# Altium footprint library E73-2G4M08S1C.PCBLib: 1 footprints
Each footprint in its own frame and in the unit in brackets; x right, y up, seen from the top. Pads: shape width x height; smd on the part's side, far side on the other; paste and mask are expansions set on the pad; w line width, h text height; cw(c..) or ccw(c..) is an arc to the next point about the centre after c.
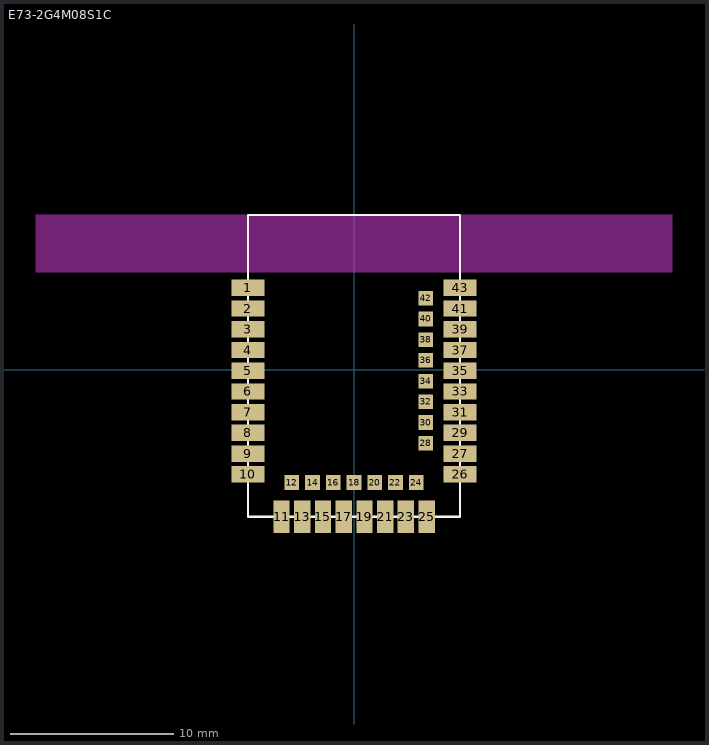
[diagram p0: the footprint, top view; thin cyan lines are the x and y axes]

## E73-2G4M08S1C [mm]
pads (43):
  rect 2x1 smd: 1(-6.5,5.03) 2(-6.5,3.76) 3(-6.5,2.49) 4(-6.5,1.22) 5(-6.5,-0.05) 6(-6.5,-1.32) 7(-6.5,-2.59) 8(-6.5,-3.86) 9(-6.5,-5.13) 10(-6.5,-6.4) 26(6.5,-6.4) 27(6.5,-5.13) 29(6.5,-3.86) 31(6.5,-2.59) 33(6.5,-1.32) 35(6.5,-0.05) 37(6.5,1.22) 39(6.5,2.49) 41(6.5,3.76) 43(6.5,5.03)
  rect 1x2 smd: 11(-4.44,-9) 13(-3.17,-9) 15(-1.9,-9) 17(-0.63,-9) 19(0.64,-9) 21(1.91,-9) 23(3.18,-9) 25(4.45,-9)
  rect 0.9x0.9 smd: 12(-3.81,-6.9) 14(-2.54,-6.9) 16(-1.27,-6.9) 18(0,-6.9) 20(1.27,-6.9) 22(2.54,-6.9) 24(3.81,-6.9) 28(4.4,-4.495) 30(4.4,-3.225) 32(4.4,-1.955) 34(4.4,-0.685) 36(4.4,0.585) 38(4.4,1.855) 40(4.4,3.125) 42(4.4,4.395)
Top Overlay:
  lines w0.127: -6.5,-9 -6.5,9.5 6.5,9.5 6.5,-9 -6.5,-9
Keep-Out Layer:
  region: 19.5,6 -19.5,6 -19.5,9.5 19.5,9.5
3D body "step_temp.STEP": height 3.1, standoff 0, extent -6.5,-9 6.5,9